# EAGLE library part 6100XX18321_61003218321 (library WR-PHD)
WR-PHD 2.54 mm SMT Pin Header Article Properties Pins 4 unitless; 6 unitless; 10 unitless; 14 unitless; 15 unitless; 16 unitless; 24 unitless; 32 unitless; 34 unitless; 36 unitless General Information General Information Operating Temperature -40 °C up to +105 °C; -40 °C up to +125 °C Compliance Lead free / RoHS Pitch 2.54 mm Durability 25 Mating cycles Rows Single Gender Pin Header Type Straight Type 1; Straight Type 2 Material Properties Insulator Material PA6T Insulator Flammability Rating UL94 V-0 Contact Material Copper Alloy Contact Plating Gold Contact Type Stamped Certification UL Approval E323964 Packaging Properties Packaging Tube Electrical Properties IR 3 A Withstanding Voltage 500 V (AC) Contact Resistance 20 mΩ RISO 1000 MΩ <https://www.we-online.com/components/media/o33202v209%20Family_WR-PHD_6100xx18221.jpg> Details see: www.we-online.com/en/components/products/PHD_2_54_SMT_PIN_HEADER_6100XX18X21 <www.we-online.com/catalog/PHD_2_54_SMT_PIN_HEADER_6100XX18X21/?utm_source=eagle_model&utm_medium=description_link&utm_campaign=eisos_eagle> Updated by Yingchun,Shan 2019-10-18 2019 (C) Würth Elektronik
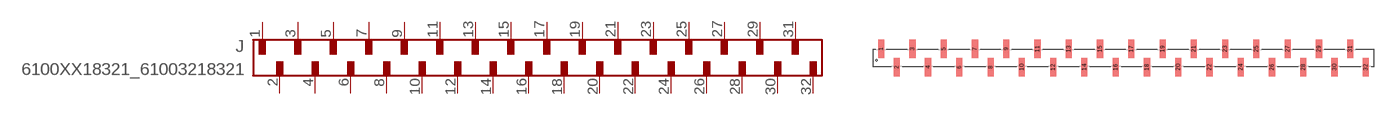
[diagram p1: symbol with the pads of 61003218321; footprint 61003218321]

Designator prefix J

## 6100XX18321_61003218321 (DATASHEET-URL: https://www.we-online.com/redexpert/spec/61003218321?ae; GENDER: Pin Header; IR: 3A; MOUNT: SMT; PACKAGING: Tube; PART-NUMBER: 61003218321; PINS: 32; PITCH: 2.54 mm; ROWS: Single; TYPE: Straight Type 2; VALUE: 61003218321)  [61003218321]
1  1  pas
2  2  pas
3  3  pas
4  4  pas
5  5  pas
6  6  pas
7  7  pas
8  8  pas
9  9  pas
10  10  pas
11  11  pas
12  12  pas
13  13  pas
14  14  pas
15  15  pas
16  16  pas
17  17  pas
18  18  pas
19  19  pas
20  20  pas
21  21  pas
22  22  pas
23  23  pas
24  24  pas
25  25  pas
26  26  pas
27  27  pas
28  28  pas
29  29  pas
30  30  pas
31  31  pas
32  32  pas

## Footprint 61003218321 (pad centres in mm)
WR-PHD 2.54 mm SMT Pin Headerr, 32 Pins
smd 1 x 3: 1 -39.37,1.5; 2 -36.83,-1.5; 3 -34.29,1.5; 4 -31.75,-1.5; 5 -29.21,1.5; 6 -26.67,-1.5; 7 -24.13,1.5; 8 -21.59,-1.5; 9 -19.05,1.5; 10 -16.51,-1.5; 11 -13.97,1.5; 12 -11.43,-1.5; 13 -8.89,1.5; 14 -6.35,-1.5; 15 -3.81,1.5; 16 -1.27,-1.5; 17 1.27,1.5; 18 3.81,-1.5; 19 6.35,1.5; 20 8.89,-1.5; 21 11.43,1.5; 22 13.97,-1.5; 23 16.51,1.5; 24 19.05,-1.5; 25 21.59,1.5; 26 24.13,-1.5; 27 26.67,1.5; 28 29.21,-1.5; 29 31.75,1.5; 30 34.29,-1.5; 31 36.83,1.5; 32 39.37,-1.5